# EAGLE library part SYN-SOIC8-LOGIC (library pipeline_soic8)
SYN-SOIC8-LOGIC Synthetic logic IC SOIC-8 Source: JLCEDA/EasyEDA Official Library (https://lceda.cn/ , https://easyeda.com). Copyright of the library data belongs to JLCEDA/EasyEDA.
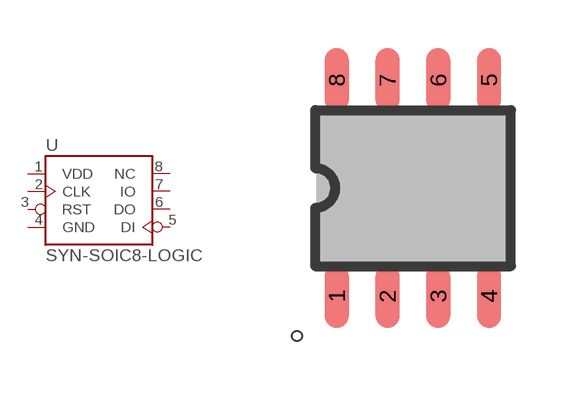
[diagram p0: symbol with the pads of SYN-SOIC-8; footprint SYN-SOIC-8]

Designator prefix U

## SYN-SOIC8-LOGIC (JLCPCB_CLASS: Basic Part; LCSC_PACKAGE: SYN-SOIC-8; LCSC_PART: C9000005; MANUFACTURER: SYN-Maker; MPN: SYN-SOIC8-LOGIC; SOURCE: Source: JLCEDA/EasyEDA Official Library (https://lceda.cn/ , https://easyeda.com). Copyright of the library data belongs to JLCEDA/EasyEDA.)  [SYN-SOIC-8]
1  VDD  pwr
2  CLK  in
3  RST  in
4  GND  pwr
5  DI  in
6  DO  out
7  IO
8  NC  pas

## Footprint SYN-SOIC-8 (pad centres in mm)
SYN-SOIC-8
smd 0.6 x 1.6: 1 -1.905,-2.7; 2 -0.635,-2.7; 3 0.635,-2.7; 4 1.905,-2.7; 5 1.905,2.7; 6 0.635,2.7; 7 -0.635,2.7; 8 -1.905,2.7